# Altium integrated library Protection.IntLib: 5 symbols
Pins are listed as number, name and electrical type; pins without a type are passive.

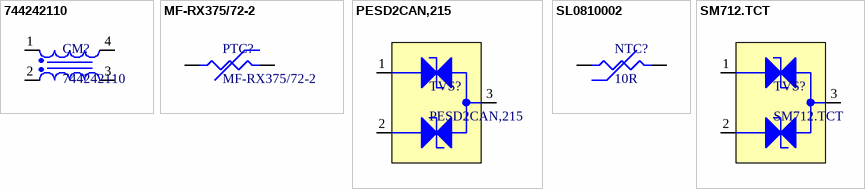
[diagram p0: symbols 744242110 to SM712.TCT]

## 744242110
designator CM?
Data Line Filter, 2 Function(s), 80V, 0.3A, 4 Pin(s); Manufacturer: Wurth Electronics; Purpose Of Usage: BASIC; Manufacturer Part Number: 744242110; RoHS: YES; Category: PROTECTION; Local Supplier: Wurth Electronics; Mount: SMD; Stock ID: ??; Sub-Category: FILTER-COMMON MODE; Supplier 1: Digikey; Supplier Part Number 1: 732-1681-1-ND
footprint WE-SLM_L6W3.3H3.3 (SMD Inductor, 4-Leads, Body 5x3.3mm)
pins: 1, 2, 3, 4

## MF-RX375/72-2
designator PTC?
PTC Resettable Fuse 3.75A(hold) 7.5A(trip) 72V 40A 3.2W 24s 0.03Ohm Radial 23.51 X 3.1 X 29.51mm T/R; Manufacturer: Bourns; Approvals: UL; Lead Diameter: 810µm; Value: 30mΩ; Purpose Of Usage: BASIC; Manufacturer Part Number: MF-RX375/72-2; RoHS: YES; Category: PROTECTION; Case/Package: Radial; China RoHS: Compliant; Height: 29.51mm; Hold Current: 3.75A; Lead Pitch: 10.2mm; Lifecycle Status: Production; Max Current Rating: 40A; Max Operating Temperature: 85°C; Min Operating Temperature: -40°C; Mounting Technology: Through Hole; Number of Terminals: 2; Packaging: Tape and Reel; Power Dissipation: 3.2W; Working Voltage: 72V; Local Supplier: OZDISAN; Mount: THT; Sub-Category: RESETABLE-FUSE-PTC; Supplier 1: Digikey; Supplier Part Number 1: 118-MF-RX375/72-2TR-ND
footprint MF-RX375/72-2
pins: 1, 2

## PESD2CAN,215
designator TVS?
PESD Series 2 Channel Bi-Directional CAN Bus ESD Protection Diode - SOT-23; Manufacturer: Nexperia USA; Purpose Of Usage: BASIC; Direction: Bidirectional; Manufacturer Part Number: PESD2CAN,215; RoHS: No; Category: PROTECTION; Case/Package: SOT-23; Local Supplier: GENERAL; Mount: SMD; Stock ID: ??; Sub-Category: TVS - BI DIRECTIONAL; Supplier Part Number 1: 1727-3891-2-ND; Supplier 1: Digikey
footprint WE-TVS_SOT23-3L (TVS Diode, package SOT23-3L)
pins: 1 I/O 1, 2 I/O 2, 3 GND

## SL0810002
designator NTC?, comment 10R
8mm, 10R, NTC; Manufacturer: Vishay Ametherm; Manufacturer Part Number: SL0810002; Purpose Of Usage: BASIC; Case/Package: custom; Category: PROTECTION; Local Supplier: GENERAL; Max Operating Temperature: 125°C; Min Operating Temperature: -55°C; Mount: THT; RoHS: YES; Stock ID: ??; Sub-Category: NTC; Supplier 1: Digikey; Supplier Part Number 1: 570-SL0810002-ND
footprint 8mm NTC
pins: 1, 2

## SM712.TCT
designator TVS?
SM Series 12 V 400 W Asymmetrical TVS Diode for Extended Common-Mode - SOT-23; Manufacturer: Semtech; Direction: Bidirectional; Number of Elements: 2; Min Breakdown Voltage: 7.5V; Clamping Voltage: 26V; Peak Pulse Power: 400W; Leakage Current: 1uA; Peak Pulse Current: 17A; Working Voltage: 12V; Max Breakdown Voltage: 13.3V; ESD Protection: Yes; Max Reverse Leakage Current: 20uA; Number of Channels: 2NUMBER; Purpose Of Usage: BASIC; Manufacturer Part Number: SM712.TCT; RoHS: YES; Category: PROTECTION; Mounting Technology: Surface Mount; Case/Package: SOT-23; Pins: 3; Min Operating Temperature: -55°C; Max Operating Temperature: 125°C; Number of Bidirectional Channels: 2; Power Dissipation: 400W; Polarity: Bidirectional; Max Power Dissipation: 400W; Breakdown Voltage: 13.3V; Voltage Rating (DC): 12V; Clamping Voltage-Max: 12V; Length: 2.9mm; Lead Free: Lead Free; Local Supplier: GENERAL; Mount: SMD; Power Rating: 400W; Price 10K: 0.5; Stock ID: ??; Sub-Category: TVS - BI DIRECTIONAL; Supplier 1: Digikey; Supplier Part Number 1: SM712CT-ND
footprint WE-TVS_SOT23-3L (TVS Diode, package SOT23-3L)
pins: 1 I/O 1, 2 I/O 2, 3 GND